# Altium footprint library PCB_PTUController.PcbLib: 106 footprints (part 1 of 7)
Each footprint in its own frame and in the unit in brackets; x right, y up, seen from the top. Pads: shape width x height; smd on the part's side, far side on the other; paste and mask are expansions set on the pad; w line width, h text height; cw(c..) or ccw(c..) is an arc to the next point about the centre after c.
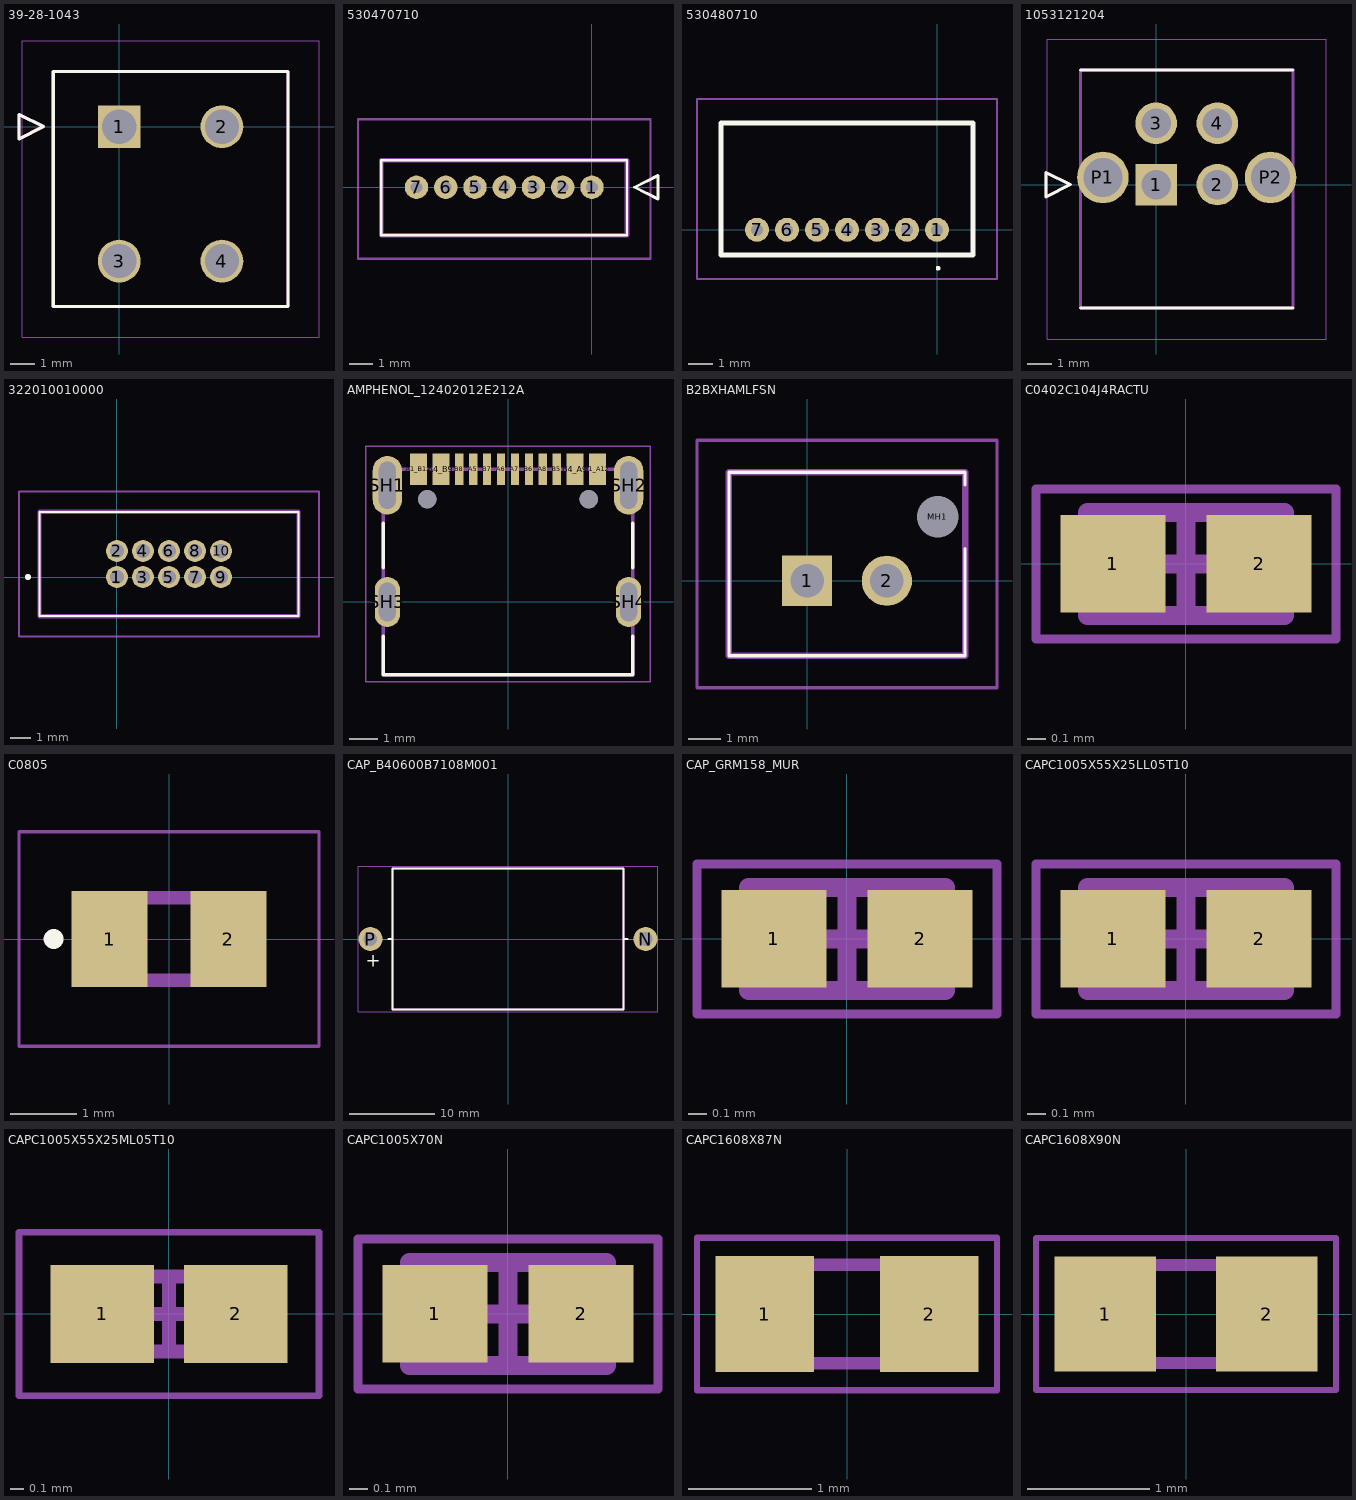
[diagram p0: the footprints below, top view; thin cyan lines are the x and y axes]

## 39-28-1043 [mm]
pads (4):
  rect 1.75x1.75 hole 1.4: 1(0,0)
  round 1.75 hole 1.4: 2(4.2,0) 3(0,-5.5) 4(4.2,-5.5)
Top Overlay:
  lines w0.127: -4.1,-0.5 -4.1,0.5 -3.1,0 -4.1,-0.5 ; -2.7,-7.35 6.9,-7.35 6.9,2.25 -2.7,2.25 -2.7,-7.35
Top 3D Body:
  lines w0.127: -4.1,-0.5 -4.1,0.5 -3.1,0 -4.1,-0.5 ; -2.7,-7.35 6.9,-7.35 6.9,2.25 -2.7,2.25 -2.7,-7.35
Top Courtyard:
  lines w0.05: -3.97,-8.62 8.17,-8.62 8.17,3.52 -3.97,3.52 -3.97,-8.62
3D body "39-28-1043.stp": height 12.76, standoff -3.54, extent -3.107,-8.74 7.29,2.26

## 530470710 [mm]
pads (7):
  round 1 hole 0.5: 1(0,0) 2(-1.25,0) 3(-2.5,0) 4(-3.75,0) 5(-5,0) 6(-6.25,0) 7(-7.5,0)
Top Overlay:
  lines w0.1: -9,-2.05 -9,1.15 1.5,1.15 1.5,-2.05 -9,-2.05
  lines w0.127: 1.822,0 2.822,-0.5 2.822,0.5 1.822,0
Top 3D Body:
  lines w0.2: -9,-2.05 -9,1.15 1.5,1.15 1.5,-2.05 -9,-2.05
Top Courtyard:
  lines w0.1: -10,-3.05 -10,2.9 2.5,2.9 2.5,-3.05 -10,-3.05
3D body "53047-0710.stp": height 4.18, standoff -2.32, extent -9,-2.1 1.5,1.1

## 530480710 [mm]
pads (7):
  round 1 hole 0.5: 1(0,0) 2(-1.25,0) 3(-2.5,0) 4(-3.75,0) 5(-5,0) 6(-6.25,0) 7(-7.5,0)
Top Overlay:
  lines w0.1: 0,-1.6 ccw(c0.05,-1.6) 0.1,-1.6 ccw(c0.05,-1.6) 0,-1.6
  lines w0.2: -9,-1.05 1.5,-1.05 1.5,4.45 -9,4.45 -9,-1.05
Top 3D Body:
  lines w0.1: -9,-1.05 1.5,-1.05 1.5,4.45 -9,4.45 -9,-1.05
Top Courtyard:
  lines w0.1: -10,-2.05 2.5,-2.05 2.5,5.45 -10,5.45 -10,-2.05
3D body "53048-0710.stp": height 3.4, standoff -2.4, extent -9,-1.045 1.5,4.455

## 1053121204 [mm]
pads (6):
  rect 1.7x1.7 hole 1.2: 1(0,0)
  round 1.7 hole 1.2: 2(2.5,0) 3(0,2.5) 4(2.5,2.5)
  round 2.1 hole 1.6: P1(-2.17,0.29) P2(4.67,0.29)
Top Overlay:
  lines w0.127: -3.08,-5.03 5.58,-5.03 ; -3.08,4.67 5.58,4.67 ; -4.5,-0.5 -4.5,0.5 -3.5,0 -4.5,-0.5
Top 3D Body:
  lines w0.127: -4.5,-0.5 -4.5,0.5 -3.5,0 -4.5,-0.5 ; -3.08,-5.03 5.58,-5.03 5.58,4.67 -3.08,4.67 -3.08,-5.03
Top Courtyard:
  lines w0.05: -4.439,-6.3 6.939,-6.3 6.939,5.94 -4.439,5.94 -4.439,-6.3
3D body "1053121204.stp": height 10.51, standoff -3.2, extent -3.06,-4.522 5.6,4.318

## 322010010000 [mm]
pads (10):
  round 1.07 hole 0.7: 1(0,0) 2(0,1.27) 3(1.27,0) 4(1.27,1.27) 5(2.54,0) 6(2.54,1.27) 7(3.81,0) 8(3.81,1.27) 9(5.08,0) 10(5.08,1.27)
Top Overlay:
  lines w0.1: -3.785,-1.915 8.865,-1.915 8.865,3.185 -3.785,3.185 -3.785,-1.915
  lines w0.2: -4.4,0 cw(c-4.35,0) -4.3,0 ; -4.4,0 ccw(c-4.35,0) -4.3,0 ; -4.4,0 cw(c-4.35,0) -4.3,0
Top 3D Body:
  lines w0.2: -3.785,-1.915 8.865,-1.915 8.865,3.185 -3.785,3.185 -3.785,-1.915
Top Courtyard:
  lines w0.1: -4.785,-2.915 9.865,-2.915 9.865,4.185 -4.785,4.185 -4.785,-2.915
3D body "3220-10-0100-00.stp": height 5.63, standoff -1.92, extent -3.866,-1.99 8.946,3.254

## AMPHENOL_12402012E212A [mm]
height 3.26
pads (18):
  rect 0.6x1.14 smd: A1_B12(-3.2,4.75) A4_B9(-2.4,4.75) B1_A12(3.2,4.75) B4_A9(2.4,4.75)
  rect 0.3x1.14 smd: A5(-1.25,4.75) A6(-0.25,4.75) A7(0.25,4.75) A8(1.25,4.75) B5(1.75,4.75) B6(0.75,4.75) B7(-0.75,4.75) B8(-1.75,4.75)
  oval 1.05x2.1 hole 0.6 slot 1.7 at 90 deg: SH1(-4.32,4.18) SH2(4.32,4.18)
  oval 0.9x1.8 hole 0.6 slot 1.4 at 90 deg: SH3(-4.32,0) SH4(4.32,0)
  round 0.65 hole 0.65 unplated: ""(-2.89,3.68) ""(2.89,3.68)
Top Overlay:
  lines w0.127: -4.47,-1.22 -4.47,-2.6 4.47,-2.6 4.47,-1.22 ; -4.47,1.22 -4.47,2.81 ; 4.47,1.22 4.47,2.81
Top 3D Body:
  lines w0.127: -4.47,-2.6 4.47,-2.6 4.47,4.75 -4.47,4.75 -4.47,-2.6
Top Courtyard:
  lines w0.05: -5.095,-2.85 -5.095,5.57 5.095,5.57 5.095,-2.85 -5.095,-2.85
3D body "step_temp.STEP": height 3.35, standoff -0.81, extent -4.47,-2.647 4.47,4.953

## B2BXHAMLFSN [mm]
pads (3):
  rect 1.575x1.575 hole 1.05: 1(0,0)
  round 1.575 hole 1.05: 2(2.5,0)
  round 0.65 hole 1.3 unplated: MH1(4.1,2)
Top Overlay:
  lines w0.1: -2.45,-2.35 4.95,-2.35 ; -2.45,-2.35 4.95,-2.35 ; -2.45,-2.35 -2.45,3.4 ; -2.45,-2.35 -2.45,3.4 ; -2.45,3.4 4.95,3.4 ; -2.45,3.4 4.95,3.4 ; 4.95,-2.35 4.95,1 4.95,-2.35 ; 4.95,3.4 4.95,3 4.95,3.4
Top 3D Body:
  lines w0.2: -2.45,-2.35 -2.45,3.4 4.95,3.4 4.95,-2.35 -2.45,-2.35
Top Courtyard:
  lines w0.1: -3.45,-3.35 -3.45,4.4 5.95,4.4 5.95,-3.35 -3.45,-3.35
3D body "B2B-XH-AM_LF__SN_.stp": height 6.9, standoff -3.5, extent -2.45,-2.355 4.95,3.395

## C0402C104J4RACTU [mm] "Chip Capacitor, 2-Leads, Body 1.00x0.50mm, IPC High Density"
height 0.55
pads (2):
  rect 0.56x0.52 smd: 1(-0.39,0) 2(0.39,0)
Top 3D Body:
  lines w0.1: -0.525,-0.275 0.525,-0.275 0.525,0.275 -0.525,0.275 -0.525,-0.275
Top Courtyard:
  lines w0.05: -0.8,-0.4 0.8,-0.4 0.8,0.4 -0.8,0.4 -0.8,-0.4
  lines w0.1: -0.275,0 0.275,0 ; 0,-0.275 0,0.275
3D body: height 0.55, standoff 0, extent 0.275,-0.275 0.525,0.275
3D body: height 0.55, standoff 0, extent -0.525,-0.275 -0.275,0.275
3D body: height 0.55, standoff 0, extent -0.275,-0.275 0.275,0.275

## C0805 [mm]
pads (2):
  rect 1.15x1.45 smd: 1(-0.9,0) 2(0.9,0)
Top Overlay:
  circle w0.2: c-1.75,0 r0.05
Top 3D Body:
  lines w0.2: -1,-0.625 -1,0.625 1,0.625 1,-0.625 -1,-0.625
Top Courtyard:
  lines w0.05: -2.275,-1.625 -2.275,1.625 2.275,1.625 2.275,-1.625 -2.275,-1.625
3D body "C0805C103K5RACTU.stp": height 0.98, standoff 0, extent -1.15,-0.78 1.15,0.77

## CAP_B40600B7108M001 [mm]
height 16.5
pads (2):
  round 2.8 hole 1.6: N(16.1,0) P(-16.1,0)
Top Overlay:
  lines w0.25: -14,0 -13.5,0 ; 14,0 13.5,0 ; -13.5,0 -13.5,8.25 13.5,8.25 13.5,0 ; -13.5,0 -13.5,-8.25 13.5,-8.25 13.5,0
  text "+" at -16.616,-3.226 h1.52
Top 3D Body:
  lines w0.127: -16.1,0 -13.5,0 ; 13.5,0 16.1,0
  lines w0.25: -13.5,-8.25 -13.5,0 -13.5,8.25 13.5,8.25 13.5,0 13.5,-8.25 -13.5,-8.25
Top Courtyard:
  lines w0.05: -17.55,-8.5 -17.55,8.5 17.55,8.5 17.55,-8.5 -17.55,-8.5
3D body "B40600B7108M001_cut.STEP": height 16.48, standoff -3, extent -16.7,-8.25 16.7,8.25

## CAP_GRM158_MUR [mm] "Chip Capacitor, 2-Leads, Body 1.00x0.50mm, IPC High Density"
height 0.55
pads (2):
  rect 0.56x0.52 smd: 1(-0.39,0) 2(0.39,0)
Top 3D Body:
  lines w0.1: -0.525,-0.275 -0.525,0.275 0.525,0.275 0.525,-0.275 -0.525,-0.275
Top Courtyard:
  lines w0.05: -0.8,-0.4 -0.8,0.4 0.8,0.4 0.8,-0.4 -0.8,-0.4
  lines w0.1: -0.275,0 0.275,0 ; 0,-0.275 0,0.275
3D body: height 0.55, standoff 0, extent -0.275,-0.275 0.275,0.275
3D body: height 0.55, standoff 0, extent -0.525,-0.275 -0.275,0.275
3D body: height 0.55, standoff 0, extent 0.275,-0.275 0.525,0.275

## CAPC1005X55X25LL05T10 [mm] "Chip Capacitor, 2-Leads, Body 1.00x0.50mm, IPC High Density"
height 0.55
pads (2):
  rect 0.56x0.52 smd: 1(-0.39,0) 2(0.39,0)
Top 3D Body:
  lines w0.1: -0.525,-0.275 -0.525,0.275 0.525,0.275 0.525,-0.275 -0.525,-0.275
Top Courtyard:
  lines w0.05: -0.8,-0.4 -0.8,0.4 0.8,0.4 0.8,-0.4 -0.8,-0.4
  lines w0.1: -0.275,0 0.275,0 ; 0,-0.275 0,0.275
3D body: height 0.55, standoff 0, extent -0.275,-0.275 0.275,0.275
3D body: height 0.55, standoff 0, extent -0.525,-0.275 -0.275,0.275
3D body: height 0.55, standoff 0, extent 0.275,-0.275 0.525,0.275

## CAPC1005X55X25ML05T10 [mm] "Chip Capacitor, 2-Leads, Body 1.00x0.50mm, IPC Low Density"
height 0.55
pads (2):
  rect 0.76x0.72 smd: 1(-0.49,0) 2(0.49,0)
Top 3D Body:
  lines w0.1: -0.525,-0.275 -0.525,0.275 0.525,0.275 0.525,-0.275 -0.525,-0.275
Top Courtyard:
  lines w0.05: -1.1,-0.6 -1.1,0.6 1.1,0.6 1.1,-0.6 -1.1,-0.6
  lines w0.1: -0.275,0 0.275,0 ; 0,-0.275 0,0.275
3D body: height 0.55, standoff 0, extent -0.275,-0.275 0.275,0.275
3D body: height 0.55, standoff 0, extent -0.525,-0.275 -0.275,0.275
3D body: height 0.55, standoff 0, extent 0.275,-0.275 0.525,0.275

## CAPC1005X70N [mm] "Chip Capacitor, 2-Leads, Body 1.00x0.50mm, IPC High Density"
height 0.77
pads (2):
  rect 0.56x0.52 smd: 1(-0.39,0) 2(0.39,0)
Top 3D Body:
  lines w0.1: -0.525,-0.275 0.525,-0.275 0.525,0.275 -0.525,0.275 -0.525,-0.275
Top Courtyard:
  lines w0.05: -0.8,-0.4 0.8,-0.4 0.8,0.4 -0.8,0.4 -0.8,-0.4
  lines w0.1: -0.275,0 0.275,0 ; 0,-0.275 0,0.275
3D body: height 0.55, standoff 0, extent 0.275,-0.275 0.525,0.275
3D body: height 0.55, standoff 0, extent -0.525,-0.275 -0.275,0.275
3D body: height 0.55, standoff 0, extent -0.275,-0.275 0.275,0.275

## CAPC1608X87N [mm]
pads (2):
  rect 0.8x0.94 smd: 1(-0.67,0) 2(0.67,0)
Top 3D Body:
  lines w0.1: -0.8,-0.4 0.8,-0.4 0.8,0.4 -0.8,0.4 -0.8,-0.4
Top Courtyard:
  lines w0.05: -1.22,-0.62 1.22,-0.62 1.22,0.62 -1.22,0.62 -1.22,-0.62
3D body "0603B221K500CT.stp": height 0.87, standoff 0, extent -0.8,-0.4 0.8,0.4

## CAPC1608X90N [mm]
pads (2):
  rect 0.83x0.94 smd: 1(-0.66,0) 2(0.66,0)
Top 3D Body:
  lines w0.1: -0.8,-0.4 -0.8,0.4 0.8,0.4 0.8,-0.4 -0.8,-0.4
Top Courtyard:
  lines w0.05: -1.225,-0.62 -1.225,0.62 1.225,0.62 1.225,-0.62 -1.225,-0.62
3D body "CC0603KRX7R7BB104.stp": height 0.8, standoff 0, extent -0.803,-0.399 0.797,0.401